# Altium schematic symbol library MP26028EQ-LF-Z.SchLib: 1 symbol
Pins are listed as number, name and electrical type; pins without a type are passive.

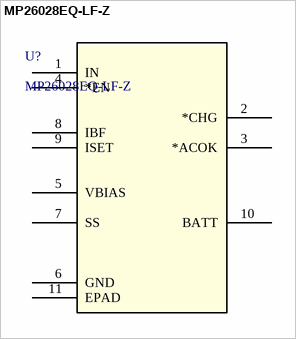
[diagram p0: symbol MP26028EQ-LF-Z]

## MP26028EQ-LF-Z
designator U?
1A Linear Li-Ion Battery Charger with Trickle Charge; Manufacturer Name: Monolithic Power Systems; Manufacturer Part Number: MP26028EQ-LF-Z
footprint IC10_MP26028_MNP
pins: 1 IN, 2 *CHG, 3 *ACOK, 4 *EN, 5 VBIAS, 6 GND (power), 7 SS, 8 IBF, 9 ISET, 10 BATT, 11 EPAD